# Altium footprint library Amin-Library.PcbLib: 601 footprints (part 19 of 38)
Each footprint in its own frame and in the unit in brackets; x right, y up, seen from the top. Pads: shape width x height; smd on the part's side, far side on the other; paste and mask are expansions set on the pad; w line width, h text height; cw(c..) or ccw(c..) is an arc to the next point about the centre after c.
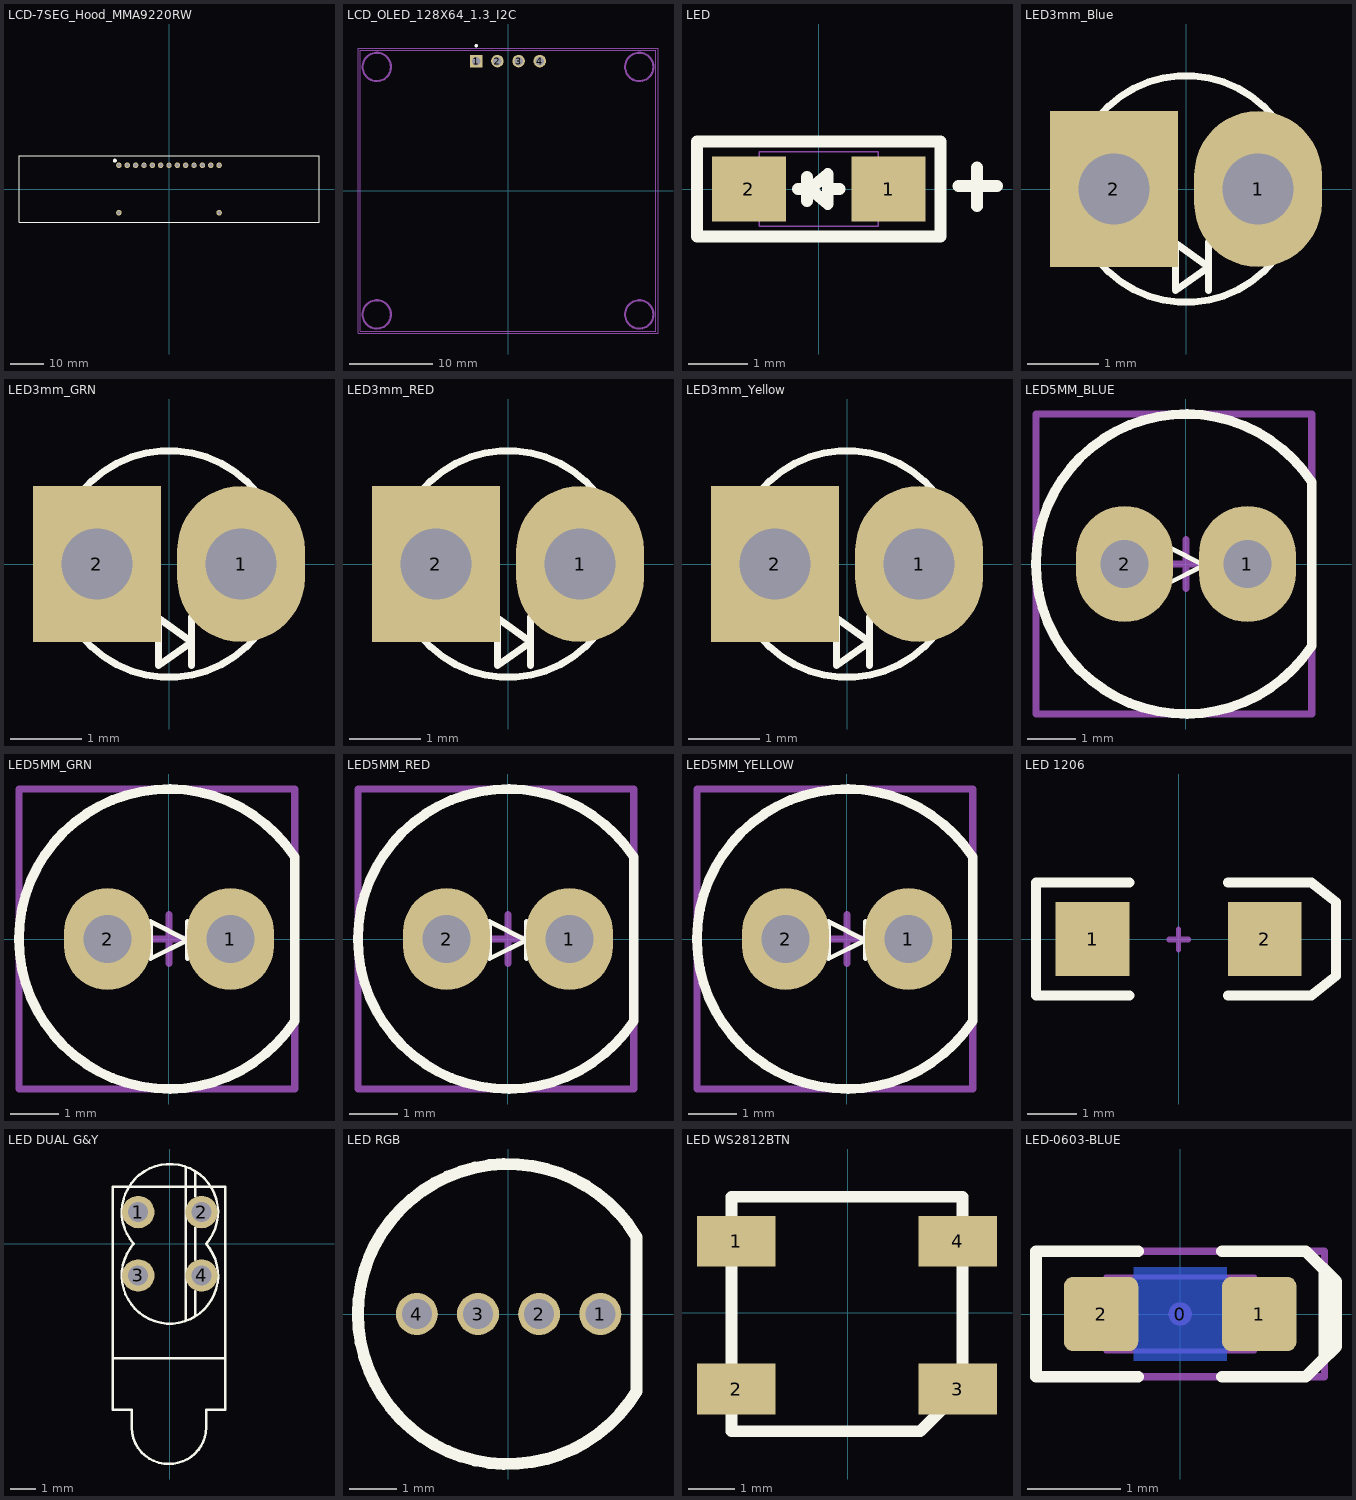
[diagram p18: the footprints below, top view; thin cyan lines are the x and y axes]

## LCD-7SEG_Hood_MMA9220RW [mm] "MMA9220RW"
pads (15):
  round 1.65 hole 1.1: 1(-15.033,7.12) 2(-12.533,7.12) 3(-10.033,7.12) 4(-7.5,7.12) 5(-5,7.12) 6(-2.5,7.12) 7(0,7.12) 8(2.5,7.12) 9(5,7.12) 10(7.5,7.12) 11(10.033,7.12) 12(12.533,7.12) 13(15.033,7.12) 14(-15.033,-7.12) 15(15.033,-7.12)
Top Overlay:
  circle w1: c-16.256,8.509 r0.1
  lines w0.2: -45,-10 45,-10 45,10 -45,10 -45,-10
3D body "end-el-san Co Ltd-King Bright CX25-12.step": height 5.51, standoff -3.49, extent -18,-5.5 18,5.5

## LCD_OLED_128X64_1.3_I2C [mm]
pads (4):
  rect 1.508x1.508 / inner round 1.508 / far side rect 1.508x1.508 hole 1: 1(-3.81,15.55)
  round 1.508 hole 1: 2(-1.27,15.55) 3(1.27,15.55) 4(3.81,15.55)
Top Overlay:
  circle w0.2: c-3.81,17.4 r0.1
Mechanical 1:
  lines w0.127: -17.75,-16.85 -17.75,16.85 17.75,16.85 17.75,-16.85 -17.75,-16.85
  lines w0.254: -14.049,-14.85 cw(c-15.75,-14.85) -14.049,-14.841 ; -14.049,14.85 cw(c-15.75,14.85) -14.049,14.859 ; 17.451,-14.85 cw(c15.75,-14.85) 17.451,-14.841 ; 17.451,14.85 cw(c15.75,14.85) 17.451,14.859
Mechanical 13:
  circle w0.2: c-3.81,17.4 r0.1
  lines w0.127: -17.75,-16.85 -17.75,16.85 17.75,16.85 17.75,-16.85 -17.75,-16.85
Mechanical 15:
  lines w0.05: -18,-17.1 18,-17.1 18,17.1 -18,17.1 -18,-17.1
3D body "OLED.step": height 2.3, standoff 0, extent -17.45,-16.55 17.25,16.75

## LED [mil]
height 170.08
pads (2):
  rect 49x43 smd: 1(46.26,0) 2(-46.26,0)
Top Overlay:
  lines w7.87: -13.78,0 -5.91,0 ; -7.87,-7.87 -7.87,7.87 ; 5.91,0 13.78,0 ; 92.52,1.97 118.11,1.97 ; 104.75,-11.44 104.75,14.15 ; -5.91,0 5.91,9.84 5.91,-9.84 -5.91,0 ; -80.71,-31.5 80.71,-31.5 80.71,31.5 -80.71,31.5 -80.71,-31.5
Mechanical 8:
  lines w1: -39.37,-24.61 39.37,-24.61 39.37,24.61 -39.37,24.61 -39.37,-24.61

## LED3mm_Blue [mm]
height 4
pads (2):
  oval 1.8x2.2 hole 1: 1(1.016,0)
  rect 1.8x2.2 hole 1: 2(-1.016,0)
Top Overlay:
  circle w0.1: c0,0 r1.6
  lines w0.1: -0.15,-1.43 -0.15,-0.764 0.32,-1.1 -0.147,-1.434 ; 0.32,-1.43 0.32,-0.75
3D body "everlight-3MM-LED-BLUE.step": height 6.93, standoff -5.64, extent -1.84,-1.905 1.586,1.895

## LED3mm_GRN [mm]
height 4
pads (2):
  oval 1.8x2.2 hole 1: 1(1.016,0)
  rect 1.8x2.2 hole 1: 2(-1.016,0)
Top Overlay:
  circle w0.1: c0,0 r1.6
  lines w0.1: -0.15,-1.43 -0.15,-0.764 0.32,-1.1 -0.147,-1.434 ; 0.32,-1.43 0.32,-0.75
3D body "LED.STEP": height 3.9, standoff -1.5, extent -1.75,-1.753 1.75,1.747

## LED3mm_RED [mm]
height 4
pads (2):
  oval 1.8x2.2 hole 1: 1(1.016,0)
  rect 1.8x2.2 hole 1: 2(-1.016,0)
Top Overlay:
  circle w0.1: c0,0 r1.6
  lines w0.1: -0.15,-1.43 -0.15,-0.764 0.32,-1.1 -0.147,-1.434 ; 0.32,-1.43 0.32,-0.75
3D body "everlight-3MM-LED-RED.step": height 5.21, standoff -7.35, extent -1.9,-1.9 1.526,1.9

## LED3mm_Yellow [mm]
height 4
pads (2):
  oval 1.8x2.2 hole 1: 1(1.016,0)
  rect 1.8x2.2 hole 1: 2(-1.016,0)
Top Overlay:
  circle w0.1: c0,0 r1.6
  lines w0.1: -0.15,-1.43 -0.15,-0.764 0.32,-1.1 -0.147,-1.434 ; 0.32,-1.43 0.32,-0.75
3D body "everlight-3MM-LED-YELLOW.step": height 5.21, standoff -7.35, extent -1.9,-1.9 1.526,1.9

## LED5MM_BLUE [mm] "LED 5MM THROUGH HOLE BLUE-Designer Abbas Basereh"
height 7.62
pads (2):
  oval 2x2.4 hole 1: 1(1.27,0) 2(-1.27,0)
Top Overlay:
  lines w0.1: 0.381,-0.403 0.381,0.359 ; -0.381,-0.403 -0.381,0.359 0.381,-0.022 -0.381,-0.403
  lines w0.2: 2.6,-1.7 2.6,1.7 ; 2.6,-1.688 cw(c0,0) 2.6,1.688
Mechanical 15:
  lines w0.15: -0.5,0 0.5,0 ; 0,-0.5 0,0.5 ; -3.1,-3.1 -3.1,3.1 2.6,3.1 2.6,-3.1 -3.1,-3.1
3D body "User Library-LEDd5B.STEP": height 12.31, standoff -2.49, extent -2.99,-2.98 2.43,3.04

## LED5MM_GRN [mm] "LED 5MM THROUGH HOLE GREEN-Designer Abbas Basereh"
height 7.62
pads (2):
  oval 1.8x2.1 hole 1: 1(1.27,0) 2(-1.27,0)
Top Overlay:
  lines w0.1: 0.381,-0.403 0.381,0.359 ; -0.381,-0.403 -0.381,0.359 0.381,-0.022 -0.381,-0.403
  lines w0.2: 2.6,-1.7 2.6,1.7 ; 2.6,-1.688 cw(c0,0) 2.6,1.688
Mechanical 15:
  lines w0.15: -0.5,0 0.5,0 ; 0,-0.5 0,0.5 ; -3.1,-3.1 -3.1,3.1 2.6,3.1 2.6,-3.1 -3.1,-3.1
3D body "LED-D5G.step": height 9.14, standoff -6.3, extent -3,-3 2.5,3

## LED5MM_RED [mm] "LED 5MM THROUGH HOLE RED-Designer Abbas Basereh"
height 7.62
pads (2):
  oval 1.8x2.1 hole 1: 1(1.27,0) 2(-1.27,0)
Top Overlay:
  lines w0.1: 0.381,-0.403 0.381,0.359 ; -0.381,-0.403 0.381,-0.022 -0.381,0.359 -0.381,-0.403
  lines w0.2: 2.6,-1.7 2.6,1.7 ; 2.6,-1.688 cw(c0,0) 2.6,1.688
Mechanical 15:
  lines w0.15: -0.5,0 0.5,0 ; 0,-0.5 0,0.5 ; -3.1,-3.1 2.6,-3.1 2.6,3.1 -3.1,3.1 -3.1,-3.1
3D body "SW3dPS-LEDd5R.STEP": height 12.31, standoff -2.49, extent -2.97,-3 2.45,3.02

## LED5MM_YELLOW [mm] "LED 5MM THROUGH HOLE YELLOW-Designer Abbas Basereh"
height 7.62
pads (2):
  oval 1.8x2.1 hole 1: 1(1.27,0) 2(-1.27,0)
Top Overlay:
  lines w0.1: 0.381,-0.403 0.381,0.359 ; -0.381,-0.403 0.381,-0.022 -0.381,0.359 -0.381,-0.403
  lines w0.2: 2.6,-1.7 2.6,1.7 ; 2.6,-1.688 cw(c0,0) 2.6,1.688
Mechanical 15:
  lines w0.15: -0.5,0 0.5,0 ; 0,-0.5 0,0.5 ; -3.1,-3.1 -3.1,3.1 2.6,3.1 2.6,-3.1 -3.1,-3.1
3D body "SW3dPS-LEDd5Y.STEP": height 12.31, standoff -2.49, extent -3,-3.01 2.42,3.01

## LED 1206 [mm]
height 4
pads (2):
  rect 1.5x1.5 smd: 1(-1.75,0) 2(1.75,0)
Top Overlay:
  lines w0.2: -1,-1.15 -2.9,-1.15 -2.9,1.15 -1,1.15 ; 1,-1.15 2.7,-1.15 3.2,-0.75 3.2,0.75 2.7,1.15 1,1.15
Mechanical 1:
  lines w0.1: -0.2,-0.025 0.2,-0.025 ; -0.2,0 0.2,0 ; 0,-0.225 0,0.175 ; 0,-0.2 0,0.2
3D body "SW3dPS-LED_SMD_SML010L_Red.STEP": height 1.36, standoff 0.01, extent -1.65,-0.722 1.65,0.728

## LED DUAL G&Y [mm]
pads (4):
  round 1.3 hole 0.8: 1(-1.27,1.27) 2(1.27,1.27) 3(-1.27,-1.27) 4(1.27,-1.27)
Top Overlay:
  lines w0.1: -2.286,-4.598 2.214,-4.598 ; -1.536,-7.374 ccw(c-0.051,-7.343) -0.02,-8.828 ; -1.536,-7.343 -1.536,-6.654 -2.286,-6.654 -2.286,2.286 2.214,2.286 2.214,-6.654 1.464,-6.654 1.464,-7.331 ; -1.458,0.004 cw(c0,1.27) 1.458,0.004 ; -1.453,0.001 ccw(c0,-1.27) 1.453,0.001 ; -0.064,-8.828 ccw(c-0.033,-7.331) 1.464,-7.362 ; 0.635,-3.05 0.635,0.381 ; 0.635,-0.381 0.635,3.05 ; 1.016,-2.85 1.016,-1.905 ; 1.016,-0.635 1.016,0.127 ; 1.016,-0.254 1.016,0.635 ; 1.016,1.905 1.016,2.85
3D body "LED_DOUAL.STEP": height 9.7, standoff -3, extent -2.18,-10.091 2.12,2.3

## LED RGB [mil] "5mm RGB LED"
pads (4):
  round 35 hole 25: 1(77,0) 2(26,0) 3(-25,0) 4(-76,0)
Top Overlay:
  lines w10: 107.07,-64.51 cw(c0,0) 107.19,64.31 107.19,-64.39

## LED WS2812BTN [mm] "Intelligent control LED  integrated light source"
pads (4):
  rect 1.7x1.1 smd: 1(-2.413,1.549) 2(-2.413,-1.651) 3(2.388,-1.651) 4(2.388,1.549)
Top Overlay:
  lines w0.254: -2.515,-2.565 1.575,-2.565 2.489,-1.651 2.489,2.515 -2.515,2.515 -2.515,-2.489

## LED-0603-BLUE [mm]
height 0.8
pads (3):
  round 0.254 on Mech15: 0(0,0)
  rrect25% 0.8x0.8 smd: 1(0.85,0) 2(-0.85,0)
Bottom Layer:
  pour cut-out: -0.5,-0.5 0.5,-0.5 0.5,0.5 -0.5,0.5
Top Overlay:
  lines w0.127: -0.45,-0.675 -1.55,-0.675 -1.55,0.675 -0.45,0.675 ; 0.45,-0.675 1.35,-0.675 1.55,-0.475 1.55,0.475 1.35,0.675 0.45,0.675 ; 1.5,-0.525 1.675,-0.35 1.675,0.35 1.525,0.5
Mechanical 13:
  lines w0.05: -0.6,0.399 0.6,0.4 0.6,-0.4 -0.6,-0.399 -0.6,0.4 ; -0.505,-0.398 -0.505,0.398 ; -0.5,-0.4 -0.8,-0.4 -0.8,0.4 -0.5,0.4 ; 0.5,-0.4 0.8,-0.4 0.8,0.4 0.5,0.4 ; 0.505,-0.398 0.505,0.398 ; -0.599,-0.398 -0.599,0.398 0.599,0.398 0.599,-0.398 -0.599,-0.398
Mechanical 15:
  lines w0.076: -1.55,-0.675 -1.55,0.675 1.55,0.675 1.55,-0.675 -1.55,-0.675
3D body "LED 0603 APT1608 BLUE.STEP": height 0.75, standoff 0, extent -0.8,-0.4 0.8,0.4